# Altium integrated library GRM0335C1H3R0BA01D.IntLib: 1 symbol
Pins are listed as number, name and electrical type; pins without a type are passive.

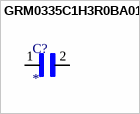
[diagram p0: symbol GRM0335C1H3R0BA01D]

## GRM0335C1H3R0BA01D
designator C?
SMD capacitor C0G(EIA) with capacitance 3.0pF Tol.0.1pF. Rated voltage 50Vdc 125C; MP: GRM0335C1H3R0BA01D; MF: Murata; SnapEDA_Link: https://www.snapeda.com/parts/GRM0335C1H3R0BA01D/Murata/view-part/?ref=snap; Purchase-URL: https://pricing.snapeda.com/search/part/GRM0335C1H3R0BA01D/?ref=eda; Value: *; Package: 0603 Taiyo Yuden; Digi-Key_Part_Number: 490-11327-1-ND; Check_prices: https://www.snapeda.com/parts/GRM0335C1H3R0BA01D/Murata/view-part/?ref=eda
footprint CAPC0603X33N
pins: 1, 2